# Altium footprint library PCB_Lib.PcbLib: 38 footprints (part 2 of 3)
Each footprint in its own frame and in the unit in brackets; x right, y up, seen from the top. Pads: shape width x height; smd on the part's side, far side on the other; paste and mask are expansions set on the pad; w line width, h text height; cw(c..) or ccw(c..) is an arc to the next point about the centre after c.
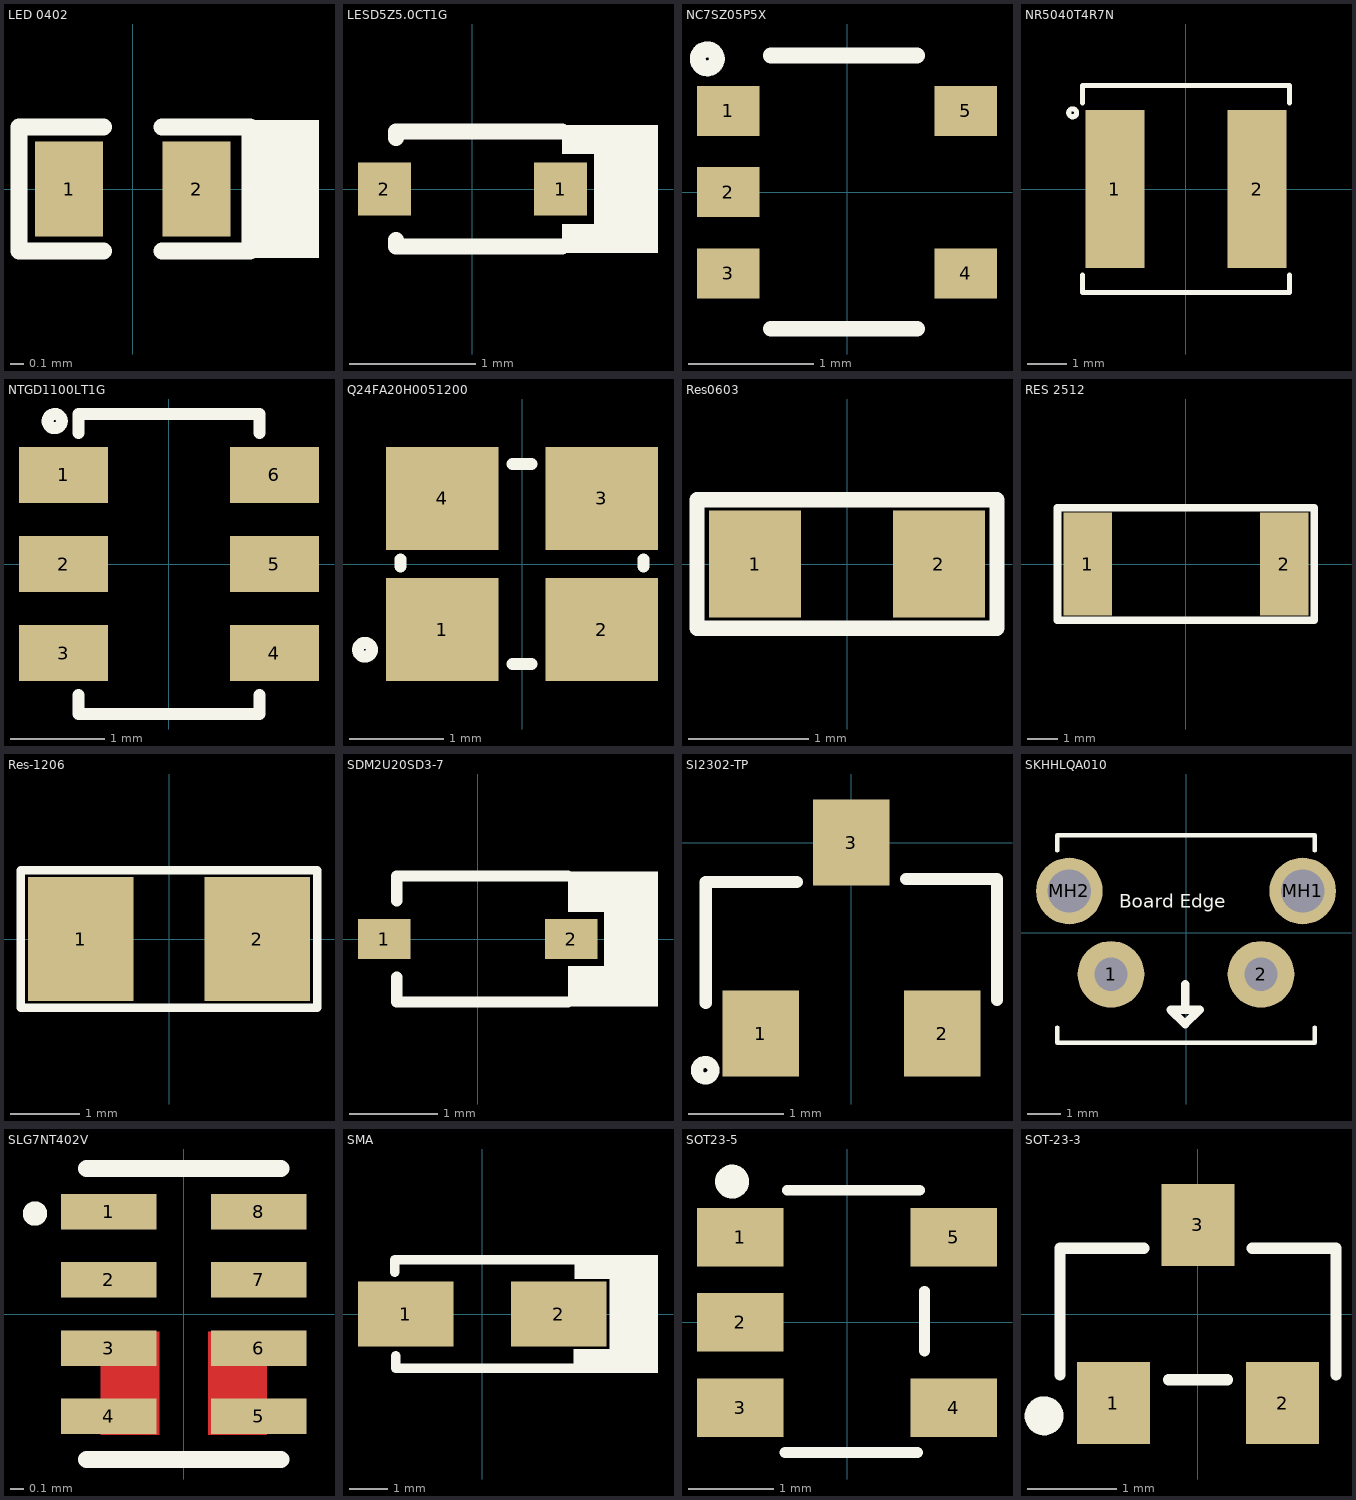
[diagram p1: the footprints below, top view; thin cyan lines are the x and y axes]

## LED 0402 [mm] "Green 520~535nm 0402 Light Emitting Diodes (LED) RoHS"
pads (2):
  rect 0.5x0.7 smd: 1(-0.47,0) 2(0.47,0)
Top Overlay:
  rectangle: 0.864,-0.508 1.372,0.508
  lines w0.127: -0.216,-0.457 -0.838,-0.457 -0.838,0.457 -0.216,0.457 ; 0.216,-0.457 0.864,-0.457 0.864,0.457 0.216,0.457
3D body "APHHS1005.STEP": height 0.5, standoff 0, extent -0.5,-0.25 0.5,0.25

## LESD5Z5.0CT1G [mm]
pads (2):
  rect 0.42x0.42 smd: 1(0.7,0) 2(-0.7,0)
Top Overlay:
  rectangle: 0.713,0.279 1.475,0.508
  rectangle: 0.713,-0.508 1.475,-0.279
  rectangle: 0.965,-0.381 1.475,0.381
  lines w0.127: -0.61,-0.457 0.713,-0.457 ; -0.61,0.457 0.713,0.457 ; -0.608,-0.456 -0.608,-0.406 ; -0.608,0.406 -0.608,0.456
3D body "User Library-SOD-523F.step": height 0.7, standoff 0, extent -0.8,-0.399 0.8,0.399

## NC7SZ05P5X [mm]
pads (5):
  rect 0.5x0.4 smd: 1(-0.95,0.65) 2(-0.95,0) 3(-0.95,-0.65) 4(0.95,-0.65) 5(0.95,0.65)
Top Overlay:
  circle w0.127: c-1.118,1.067 r0.076
  lines w0.127: -0.61,-1.092 0.559,-1.092 ; -0.61,1.092 0.559,1.092
3D body "User Library-sot353.step": height 0.96, standoff -0.04, extent -1.15,-1.05 1.15,1.05

## NR5040T4R7N [mm]
pads (2):
  rect 1.5x4 smd: 1(-1.8,0) 2(1.8,0)
Top Overlay:
  circle w0.127: c-2.87,1.93 r0.102
  lines w0.127: -2.616,-2.184 -2.616,-2.616 2.616,-2.616 2.616,-2.184 ; -2.616,2.184 -2.616,2.616 2.616,2.616 2.616,2.184
3D body "IND_TAIYO_NR5040_TAY.step": height 4.09, standoff 0, extent -2.553,-2.555 2.553,2.555

## NTGD1100LT1G [mm]
pads (6):
  rect 0.95x0.6 smd: 1(-1.125,0.95) 2(-1.125,0) 3(-1.125,-0.95) 4(1.125,-0.95) 5(1.125,0) 6(1.125,0.95)
Top Overlay:
  circle w0.127: c-1.219,1.524 r0.076
  lines w0.127: -0.965,-1.397 -0.965,-1.6 0.965,-1.6 0.965,-1.397 ; -0.965,1.397 -0.965,1.6 0.965,1.6 0.965,1.397
3D body "TSOP6_1P70X3P10_ONS.step": height 1.09, standoff 0, extent -1.499,-1.549 1.499,1.549

## Q24FA20H0051200 [mm] "16MHz SMD Crystal Resonator 10pF 80O ±10ppm"
pads (4):
  rect 1.2x1.1 smd: 1(-0.85,-0.7) 2(0.85,-0.7) 3(0.85,0.7) 4(-0.85,0.7)
Top Overlay:
  circle w0.127: c-1.676,-0.914 r0.074
  lines w0.127: -1.295,-0.025 -1.295,0.051 ; -0.102,-1.067 0.102,-1.067 ; -0.102,1.067 0.102,1.067 ; 1.295,-0.025 1.295,0.051
3D body "User Library-CRY_2520.STEP": height 0.55, standoff 0, extent -1.25,-1 1.25,1

## Res0603 [mil]
pads (2):
  rect 30x35 smd: 1(-30,0) 2(30,0)
Top Overlay:
  lines w5: -49,-21 49,-21 49,21 -49,21 -49,-21
3D body "User Library-RESC1608X05N.step": height 17.76, standoff 0, extent -30.52,-16.74 30.51,16.73

## RES 2512 [mm]
pads (2):
  rect 1.6x3.4 smd: 1(-3.25,0) 2(3.25,0)
Top Overlay:
  lines w0.254: -4.242,-1.854 -4.242,1.854 4.237,1.854 4.237,-1.854 -4.242,-1.854
3D body "CircuitWorks-RESISTOR 2512.step": height 0.58, standoff -0.03, extent -3.175,-1.63 3.175,1.63

## Res-1206 [mil]
pads (2):
  rect 60x70 smd: 1(-50,0) 2(50,0)
Top Overlay:
  lines w5: -84,-39 -84,39 84,39 84,-39 -84,-39
3D body "User Library-1206 SMD Resistor.step": height 39.45, standoff 0, extent -62.99,-31.49 63,31.51

## SDM2U20SD3-7 [mm]
pads (2):
  rect 0.59x0.45 smd: 1(-1.055,0) 2(1.055,0)
Top Overlay:
  rectangle: 1.422,-0.33 2.032,0.33
  rectangle: 1.016,-0.762 2.032,-0.305
  rectangle: 1.016,0.305 2.032,0.762
  lines w0.127: -0.914,-0.432 -0.914,-0.711 1.016,-0.711 ; -0.914,0.432 -0.914,0.711 1.016,0.711
3D body "User Library-SOD323-1.step": height 1.1, standoff 0, extent -1.3,-0.675 1.3,0.675

## SI2302-TP [mm] "MOSFET N-CH 20V 3A SOT-23"
pads (3):
  rect 0.8x0.9 smd: 1(-0.95,-2) 2(0.95,-2) 3(0,0)
Top Overlay:
  circle w0.127: c-1.529,-2.383 r0.086
  lines w0.127: -1.524,-1.678 -1.524,-0.411 -0.572,-0.411 ; 0.572,-0.381 1.524,-0.381 1.524,-1.648
3D body "SOT-23_MCC.step": height 1.22, standoff 0, extent -1.524,-2.337 1.524,0.305

## SKHHLQA010 [mm]
pads (4):
  round 2 hole 1: 1(-2.25,-1.25) 2(2.25,-1.25)
  round 2 hole 1.3: MH1(3.5,1.25) MH2(-3.5,1.25)
Top Overlay:
  lines w0.127: -3.861,-2.845 -3.861,-3.302 3.861,-3.302 3.861,-2.845 ; -3.861,2.464 -3.861,2.921 3.861,2.921 3.861,2.464
  lines w0.254: -0.025,-1.549 -0.025,-2.311 ; 0.381,-2.337 -0.025,-2.743 -0.457,-2.311 -0.025,-2.311 ; 0.406,-2.311 -0.025,-2.311
  text "Board Edge" at -2.007,0.743 h0.4
3D body "skhhlqa010.stp": height 7.9, standoff -3, extent -4.25,-9.53 4.25,2.87

## SLG7NT402V [mm]
pads (8):
  rect 0.7x0.26 smd: 1(-0.55,0.75) 2(-0.55,0.25) 3(-0.55,-0.25) 4(-0.55,-0.75) 5(0.55,-0.75) 6(0.55,-0.25) 7(0.55,0.25) 8(0.55,0.75)
Top Layer:
  rectangle: -0.61,-0.889 -0.178,-0.127
  region: 0.61,-0.127 0.178,-0.127 0.178,-0.889 0.61,-0.889
Top Overlay:
  circle w0.127: c-1.092,0.737 r0.025
  lines w0.127: -0.711,-1.067 0.711,-1.067 ; -0.711,1.067 0.711,1.067
3D body "pppp.STEP": height 0.84, standoff -0.02, extent -0.75,-1 0.75,1

## SMA [mm] "DIODE GEN PURP 50V 1A SMA"
pads (2):
  rect 2.5x1.7 smd: 1(-2,0) 2(2,0)
Top Overlay:
  region: 4.394,-0.914 2.388,-0.914 2.388,-1.549 4.394,-1.549
  region: 4.597,1.549 3.327,1.549 3.327,-1.549 4.597,-1.549
  region: 4.394,1.549 2.413,1.549 2.413,0.914 4.394,0.914
  lines w0.254: -2.286,1.092 -2.286,1.422 2.388,1.422 ; -2.261,-1.092 -2.261,-1.422 2.413,-1.422
3D body "User Library-DO-214AC SMA.step": height 2.4, standoff 0, extent -2.6,-1.3 2.6,1.3

## SOT23-5 [mil] "SOT23-5 Package"
height 51.18
pads (5):
  rect 40x27 smd: 1(-49.21,39.37) 2(-49.21,0) 3(-49.21,-39.37) 4(49.21,-39.37) 5(49.21,39.37)
Top Overlay:
  circle w10: c-53,65 r2.81
  lines w5: -28.56,-60.02 32.46,-60.02 ; -27.56,61.02 33.46,61.02 ; 35.79,-13.19 35.79,14.37
3D body "User Library-SOT-23-5-1.STEP": height 43.31, standoff -0.06, extent -49.21,-59.05 49.22,59.06

## SOT-23-3 [mm] "TRANS NPN 40V 0.6A SOT23"
pads (3):
  rect 0.82x0.92 smd: 1(-0.95,-1) 2(0.95,-1) 3(0,1)
Top Overlay:
  circle w0.254: c-1.727,-1.143 r0.092
  lines w0.127: -1.549,-0.686 -1.549,0.737 -0.61,0.737 ; -0.33,-0.737 0.33,-0.737 ; 0.61,0.737 1.549,0.737 1.549,-0.686
3D body "CircuitWorks-SOT-23.step": height 1.1, standoff 0, extent -1.5,-1.25 1.5,1.25